# Altium footprint library Connectors.PcbLib: 120 footprints (part 7 of 8)
Each footprint in its own frame and in the unit in brackets; x right, y up, seen from the top. Pads: shape width x height; smd on the part's side, far side on the other; paste and mask are expansions set on the pad; w line width, h text height; cw(c..) or ccw(c..) is an arc to the next point about the centre after c.
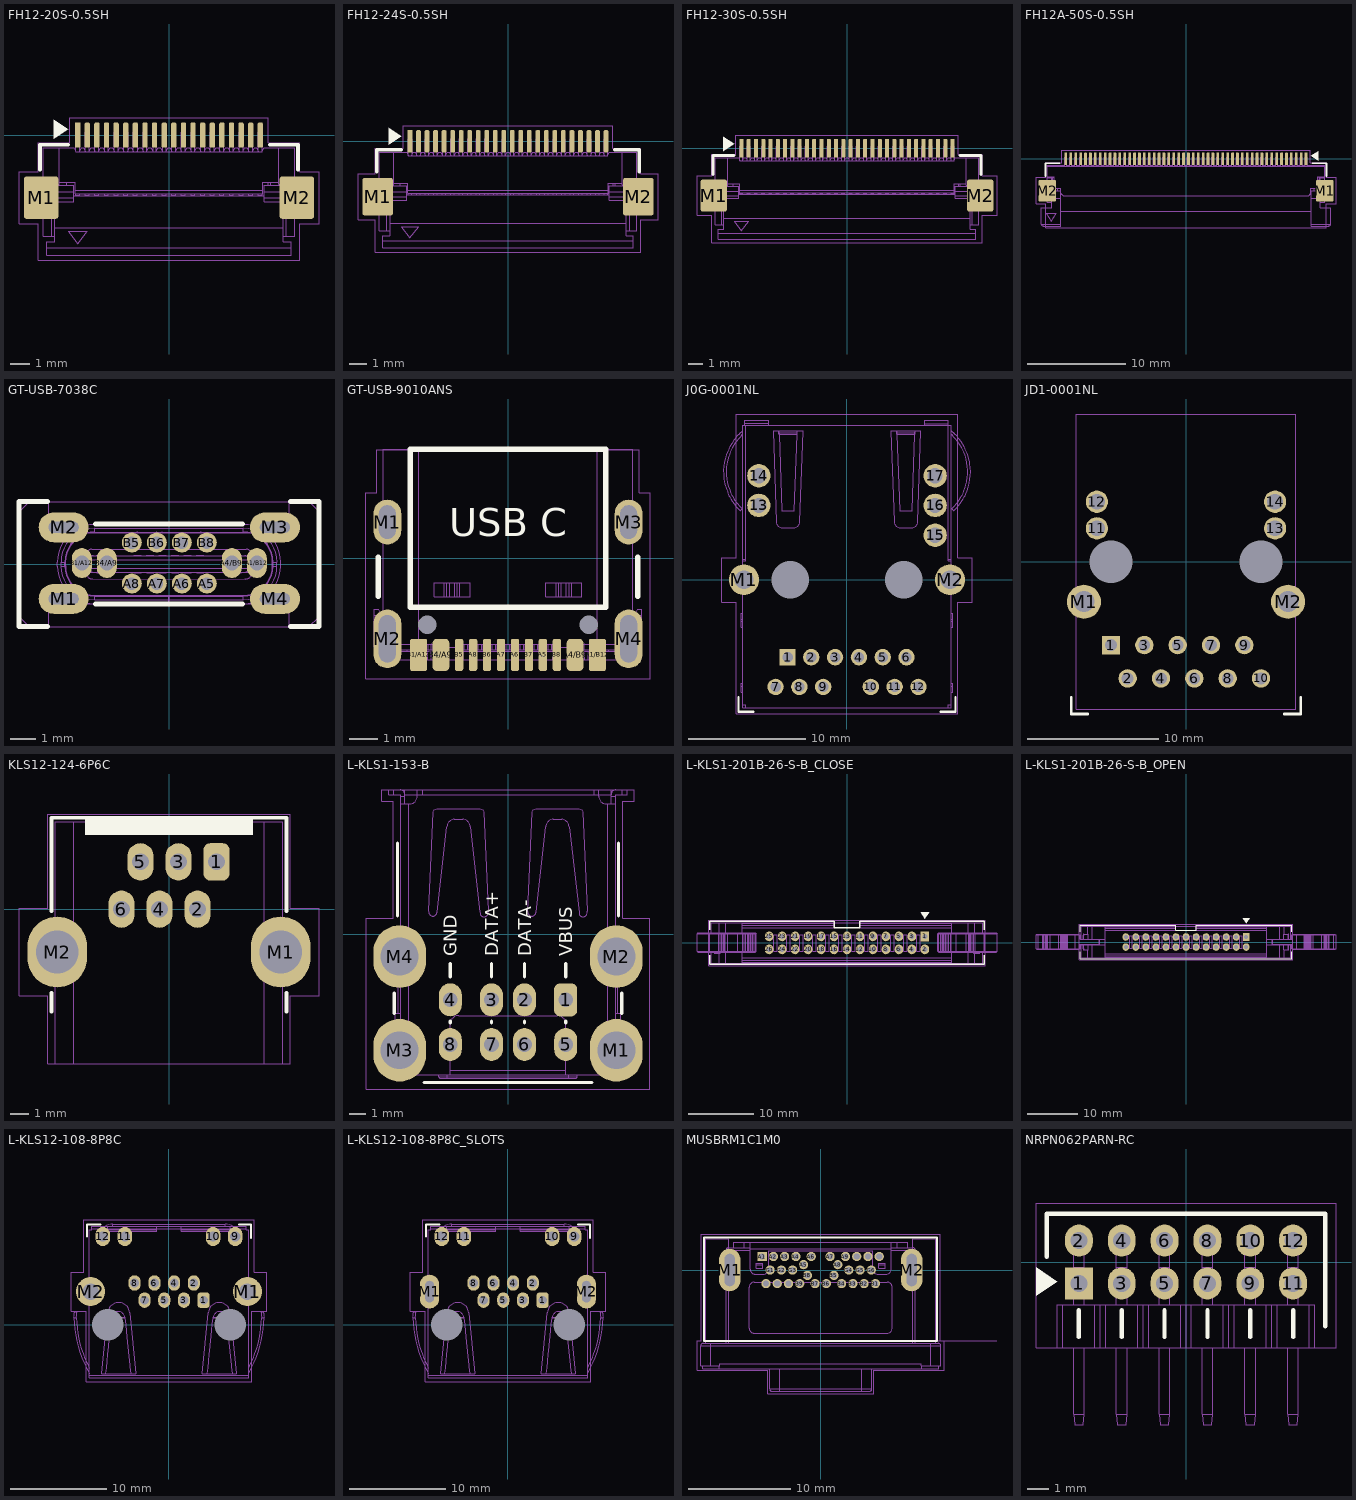
[diagram p6: the footprints below, top view; thin cyan lines are the x and y axes]

## FH12-20S-0.5SH [mm] "CONN FPC/FFC 20POS .5MM ZIF Contact Bottom"
height 2
pads (22):
  rect 0.275x1.3 smd paste-0.012 mask+0.04: 1(-4.75,0)
  rrect50% 0.275x1.3 smd paste-0.012 mask+0.04: 2(-4.25,0) 3(-3.75,0) 4(-3.25,0) 5(-2.75,0) 6(-2.25,0) 7(-1.75,0) 8(-1.25,0) 9(-0.75,0) 10(-0.25,0) 11(0.25,0) 12(0.75,0) 13(1.25,0) 14(1.75,0) 15(2.25,0) 16(2.75,0) 17(3.25,0) 18(3.75,0) 19(4.25,0) 20(4.75,0)
  rrect15% 1.8x2.2 smd paste-2 mask+0.05: M1(-6.65,-3.25) M2(6.65,-3.25)
Top Overlay:
  region: -5.25,0.3 -6,-0.2 -6,0.8
  lines w0.2: -6.7,-1.8 -6.7,-0.5 -5.25,-0.5 ; 5.25,-0.5 6.7,-0.5 6.7,-1.8
Top Paste:
  rectangle: -7.55,-4.35 -6.75,-3.35
  region: -5.75,-3.35 -6.55,-3.35 -6.55,-4.35 -5.75,-4.35
  rectangle: -7.55,-3.15 -6.75,-2.15
  region: -5.75,-2.15 -6.55,-2.15 -6.55,-3.15 -5.75,-3.15
  rectangle: 5.75,-4.35 6.55,-3.35
  region: 7.55,-3.35 6.75,-3.35 6.75,-4.35 7.55,-4.35
  rectangle: 5.75,-3.15 6.55,-2.15
  region: 7.55,-2.15 6.75,-2.15 6.75,-3.15 7.55,-3.15
Top Courtyard:
  lines w0.025: -7.8,-4.6 -7.8,-1.9 -6.8,-1.9 -6.8,-0.4 -5.15,-0.4 -5.15,0.9 5.15,0.9 5.15,-0.4 6.8,-0.4 6.8,-1.9 7.8,-1.9 7.8,-4.6 6.8,-4.6 6.8,-6.5 -6.8,-6.5 -6.8,-4.6 -7.8,-4.6
Top Assembly:
  drawing of 336 lines, arcs and shapes, not listed
  text ".Designator" at -4.511,-2.303 h2
3D body "FH12-20S-0.5SH.x_t": height 2.09, standoff -0.01, extent -7.05,-6.25 7.05,0.15

## FH12-24S-0.5SH [mm] "CONN FPC/FFC 24POS .5MM ZIF Contact Bottom"
height 2
pads (26):
  rect 0.275x1.3 smd paste-0.012 mask+0.04: 1(-5.75,0)
  rrect50% 0.275x1.3 smd paste-0.012 mask+0.04: 2(-5.25,0) 3(-4.75,0) 4(-4.25,0) 5(-3.75,0) 6(-3.25,0) 7(-2.75,0) 8(-2.25,0) 9(-1.75,0) 10(-1.25,0) 11(-0.75,0) 12(-0.25,0) 13(0.25,0) 14(0.75,0) 15(1.25,0) 16(1.75,0) 17(2.25,0) 18(2.75,0) 19(3.25,0) 20(3.75,0) 21(4.25,0) 22(4.75,0) 23(5.25,0) 24(5.75,0)
  rrect15% 1.8x2.2 smd paste-2 mask+0.05: M1(-7.65,-3.25) M2(7.65,-3.25)
Top Overlay:
  region: -6.25,0.3 -7,-0.2 -7,0.8
  lines w0.2: -7.7,-1.8 -7.7,-0.5 -6.25,-0.5 ; 6.25,-0.5 7.7,-0.5 7.7,-1.8
Top Paste:
  rectangle: -8.55,-4.35 -7.75,-3.35
  region: -6.75,-3.35 -7.55,-3.35 -7.55,-4.35 -6.75,-4.35
  rectangle: -8.55,-3.15 -7.75,-2.15
  region: -6.75,-2.15 -7.55,-2.15 -7.55,-3.15 -6.75,-3.15
  rectangle: 6.75,-4.35 7.55,-3.35
  region: 8.55,-3.35 7.75,-3.35 7.75,-4.35 8.55,-4.35
  rectangle: 6.75,-3.15 7.55,-2.15
  region: 8.55,-2.15 7.75,-2.15 7.75,-3.15 8.55,-3.15
Top Courtyard:
  lines w0.025: -8.8,-4.6 -8.8,-1.9 -7.8,-1.9 -7.8,-0.4 -6.15,-0.4 -6.15,0.9 6.15,0.9 6.15,-0.4 7.8,-0.4 7.8,-1.9 8.8,-1.9 8.8,-4.6 7.8,-4.6 7.8,-6.5 -7.8,-6.5 -7.8,-4.6 -8.8,-4.6
Top Assembly:
  drawing of 392 lines, arcs and shapes, not listed
  text ".Designator" at -4.511,-2.303 h2
3D body "FH12-24S-0.5SH.x_t": height 2.09, standoff -0.01, extent -8.05,-6.25 8.05,0.15

## FH12-30S-0.5SH [mm] "CONN FPC/FFC 30POS .5MM ZIF Contact Bottom"
height 2
pads (32):
  rect 0.275x1.3 smd paste-0.012 mask+0.04: 1(-7.25,0)
  rrect50% 0.275x1.3 smd paste-0.012 mask+0.04: 2(-6.75,0) 3(-6.25,0) 4(-5.75,0) 5(-5.25,0) 6(-4.75,0) 7(-4.25,0) 8(-3.75,0) 9(-3.25,0) 10(-2.75,0) 11(-2.25,0) 12(-1.75,0) 13(-1.25,0) 14(-0.75,0) 15(-0.25,0) 16(0.25,0) 17(0.75,0) 18(1.25,0) 19(1.75,0) 20(2.25,0) 21(2.75,0) 22(3.25,0) 23(3.75,0) 24(4.25,0) 25(4.75,0) 26(5.25,0) 27(5.75,0) 28(6.25,0) 29(6.75,0) 30(7.25,0)
  rrect15% 1.8x2.2 smd paste-2 mask+0.05: M1(-9.15,-3.25) M2(9.15,-3.25)
Top Overlay:
  region: -7.75,0.3 -8.5,-0.2 -8.5,0.8
  lines w0.2: -9.2,-1.8 -9.2,-0.5 -7.75,-0.5 ; 7.75,-0.5 9.2,-0.5 9.2,-1.8
Top Paste:
  rectangle: -10.05,-4.35 -9.25,-3.35
  region: -8.25,-3.35 -9.05,-3.35 -9.05,-4.35 -8.25,-4.35
  rectangle: -10.05,-3.15 -9.25,-2.15
  region: -8.25,-2.15 -9.05,-2.15 -9.05,-3.15 -8.25,-3.15
  rectangle: 8.25,-4.35 9.05,-3.35
  region: 10.05,-3.35 9.25,-3.35 9.25,-4.35 10.05,-4.35
  rectangle: 8.25,-3.15 9.05,-2.15
  region: 10.05,-2.15 9.25,-2.15 9.25,-3.15 10.05,-3.15
Top Courtyard:
  lines w0.025: -10.3,-4.6 -10.3,-1.9 -9.3,-1.9 -9.3,-0.4 -7.65,-0.4 -7.65,0.9 7.65,0.9 7.65,-0.4 9.3,-0.4 9.3,-1.9 10.3,-1.9 10.3,-4.6 9.3,-4.6 9.3,-6.5 -9.3,-6.5 -9.3,-4.6 -10.3,-4.6
Top Assembly:
  drawing of 991 lines, arcs and shapes, not listed
  text ".Designator" at -4.511,-2.303 h2
3D body "FH12-30S-0.5SH.STEP": height 2.09, standoff -0.01, extent -9.55,-6.25 9.55,0.15

## FH12A-50S-0.5SH [mm] "CONN FPC/FFC 50POS .5MM, ZIF Contact Top"
height 2
pads (52):
  rect 0.275x1.3 smd paste-0.012 mask+0.04: 1(12.25,0)
  rrect50% 0.275x1.3 smd paste-0.012 mask+0.04: 2(11.75,0) 3(11.25,0) 4(10.75,0) 5(10.25,0) 6(9.75,0) 7(9.25,0) 8(8.75,0) 9(8.25,0) 10(7.75,0) 11(7.25,0) 12(6.75,0) 13(6.25,0) 14(5.75,0) 15(5.25,0) 16(4.75,0) 17(4.25,0) 18(3.75,0) 19(3.25,0) 20(2.75,0) 21(2.25,0) 22(1.75,0) 23(1.25,0) 24(0.75,0) 25(0.25,0) 26(-0.25,0) 27(-0.75,0) 28(-1.25,0) 29(-1.75,0) 30(-2.25,0) 31(-2.75,0) 32(-3.25,0) 33(-3.75,0) 34(-4.25,0) 35(-4.75,0) 36(-5.25,0) 37(-5.75,0) 38(-6.25,0) 39(-6.75,0) 40(-7.25,0) 41(-7.75,0) 42(-8.25,0) 43(-8.75,0) 44(-9.25,0) 45(-9.75,0) 46(-10.25,0) 47(-10.75,0) 48(-11.25,0) 49(-11.75,0) 50(-12.25,0)
  rrect15% 1.8x2.2 smd paste-2 mask+0.05: M1(14.15,-3.25) M2(-14.15,-3.25)
Top Overlay:
  region: 12.75,0.3 13.5,-0.2 13.5,0.8
  lines w0.2: -14.35,-1.75 -14.35,-0.45 -12.9,-0.45 ; 12.9,-0.45 14.35,-0.45 14.35,-1.75
Top Paste:
  region: -13.25,-2.15 -14.05,-2.15 -14.05,-3.15 -13.25,-3.15
  rectangle: -15.05,-3.15 -14.25,-2.15
  region: -13.25,-3.35 -14.05,-3.35 -14.05,-4.35 -13.25,-4.35
  rectangle: -15.05,-4.35 -14.25,-3.35
  region: 15.05,-2.15 14.25,-2.15 14.25,-3.15 15.05,-3.15
  rectangle: 13.25,-3.15 14.05,-2.15
  region: 15.05,-3.35 14.25,-3.35 14.25,-4.35 15.05,-4.35
  rectangle: 13.25,-4.35 14.05,-3.35
Top Courtyard:
  lines w0.025: -15.3,-4.6 -14.3,-4.6 -14.3,-7.05 14.3,-7.05 14.3,-4.6 15.3,-4.6 15.3,-1.9 14.3,-1.9 14.3,-0.4 12.65,-0.4 12.65,0.9 -12.65,0.9 -12.65,-0.4 -14.3,-0.4 -14.3,-1.9 -15.3,-1.9 -15.3,-4.6
Top Assembly:
  drawing of 627 lines, arcs and shapes, not listed
  text ".Designator" at -4.511,-2.653 h2
3D body "FH12A-50S-0.5SH.x_t": height 2.05, standoff -0.1, extent -14.75,-6.85 14.75,0.15

## GT-USB-7038C [mm] "USB TYPE C Vertical 16pin THT Connector H=10.5mm"
height 2.56
pads (16):
  oval 0.8x1.2 hole 0.6 paste-2539.97 mask+0.05: A1/B12(3.512,0.038) A4/B9(2.512,0.038) B1/A12(-3.488,0.038) B4/A9(-2.488,0.038)
  round 0.8 hole 0.5 paste-2539.97 mask+0.05: A5(1.512,-0.782) A6(0.512,-0.782) A7(-0.488,-0.782) A8(-1.488,-0.782) B5(-1.488,0.858) B6(-0.488,0.858) B7(0.512,0.858) B8(1.512,0.858)
  oval 2x1.2 hole 0.45 slot 1.2 at 0 deg paste-2539.97 mask+0.05: M1(-4.213,-1.392) M2(-4.213,1.468) M3(4.237,1.468) M4(4.237,-1.392)
Top Overlay:
  lines w0.2: -4.85,-2.5 -6,-2.5 -6,2.5 -4.85,2.5 ; -2.95,-1.6 2.95,-1.6 ; -2.95,1.6 2.95,1.6 ; 4.85,-2.5 6,-2.5 6,2.5 4.85,2.5
Top Courtyard:
  lines w0.025: -6,-2.5 -6,2.5 6,2.5 6,-2.5 -6,-2.5
Top Assembly:
  drawing of 350 lines, arcs and shapes, not listed
  text ".Designator" at -4.511,2.047 h2
3D body "GT-USB-7038C.x_t": height 10.52, standoff -1.78, extent -6,-2.5 6,2.5

## GT-USB-9010ANS [mm] "USB TYPE C 16pin SMT Connector L=7.35mm"
height 2.56
pads (18):
  rrect20% 0.6x1.15 smd paste+0 mask+0.05: A1/B12(3.2,-3.45) B1/A12(-3.2,-3.45)
  rrect50% 0.6x1.15 smd paste+0 mask+0.05: A4/B9(2.4,-3.45) B4/A9(-2.4,-3.45)
  rrect50% 0.3x1.15 smd paste+0 mask+0.05: A5(1.25,-3.45) A6(0.25,-3.45) A7(-0.25,-3.45) A8(-1.25,-3.45) B5(-1.75,-3.45) B6(-0.75,-3.45) B7(0.75,-3.45) B8(1.75,-3.45)
  round 0 hole 0.65 unplated: KEY(-2.89,-2.375) KEY(2.89,-2.375)
  oval 1x1.6 hole 0.6 slot 1.2 at 90 deg paste-2539.97 mask+0.05: M1(-4.32,1.305) M3(4.32,1.305)
  oval 1x2.1 hole 0.6 slot 1.7 at 90 deg paste-2539.97 mask+0.05: M2(-4.32,-2.875) M4(4.32,-2.875)
Top Overlay:
  lines w0.2: -4.65,-1.353 -4.65,0.047 ; 4.65,-1.353 4.65,0.047 ; -3.5,-1.745 -3.5,3.905 3.5,3.905 3.5,-1.745 -3.5,-1.745
  text "USB C" at -2.111,0.8 h1
Top Courtyard:
  lines w0.025: -5.1,-4.3 5.1,-4.3 5.1,2.35 4.7,2.35 4.7,3.9 -4.7,3.9 -4.7,2.35 -5.1,2.35 -5.1,-4.3
Top Assembly:
  drawing of 185 lines, arcs and shapes, not listed
  text ".Designator" at -4.511,0.319 h2
3D body "698b116-264-211.x_t": height 3.25, standoff -0.91, extent -4.79,-3.803 4.79,3.905

## J0G-0001NL [mm] "RJ45 Connector"
height 0.6
pads (21):
  rect 1.4x1.4 hole 0.9: 1(-5.075,-6.6)
  round 1.4 hole 0.9: 2(-3.045,-6.6) 3(-1.015,-6.6) 4(1.015,-6.6) 5(3.045,-6.6) 6(5.075,-6.6) 7(-6.095,-9.14) 8(-4.065,-9.14) 9(-2.035,-9.14) 10(2.035,-9.14) 11(4.065,-9.14) 12(6.095,-9.14)
  round 0 hole 3.2 unplated mask+0.05: 3.25mm(-4.825,0) 3.25mm(4.825,0)
  round 2 hole 1.3: 13(-7.52,6.35) 14(-7.52,8.89) 15(7.52,3.81) 16(7.52,6.35) 17(7.52,8.89)
  round 2.6 / inner round 2 / far side round 2.6 hole 1.6: M1(-8.79,0) M2(8.79,0)
Top Overlay:
  lines w0.2: -9.265,-10 -9.265,-11.27 -7.995,-11.27 ; 7.995,-11.27 9.265,-11.27 9.265,-10
Top Courtyard:
  lines w0.025: -10.7,-1.9 -9.45,-1.9 -9.45,-11.45 9.45,-11.45 9.45,-1.9 10.7,-1.9 10.7,1.9 9.45,1.9 9.45,14.15 -9.45,14.15 -9.45,1.9 -10.7,1.9 -10.7,-1.9
Top Assembly:
  drawing of 238 lines, arcs and shapes, not listed
  text ".Designator" at -6.763,-0.679 h3
3D body "J0G-0001NL_3D.x_t": height 13.1, standoff -3.41, extent -10.541,-10.92 10.541,13.628

## JD1-0001NL [mm] "RJ45 Connector"
height 0.6
pads (18):
  rect 1.4x1.4 hole 0.9: 1(-5.715,-6.35)
  round 1.4 hole 0.9: 2(-4.445,-8.89) 3(-3.175,-6.35) 4(-1.905,-8.89) 5(-0.635,-6.35) 6(0.635,-8.89) 7(1.905,-6.35) 8(3.175,-8.89) 9(4.445,-6.35) 10(5.715,-8.89)
  round 0 hole 3.25 unplated mask+0.05: 3.25mm(-5.715,0) 3.25mm(5.715,0)
  round 1.7 hole 1.2: 11(-6.785,2.54) 12(-6.785,4.57) 13(6.785,2.54) 14(6.785,4.57)
  round 2.6 / inner round 2 / far side round 2.6 hole 1.6: M1(-7.775,-3.05) M2(7.775,-3.05)
Top Overlay:
  lines w0.2: -8.75,-10.33 -8.75,-11.6 -7.48,-11.6 ; 7.48,-11.6 8.75,-11.6 8.75,-10.33
Top Courtyard:
  lines w0.025: -8.375,-11.25 -8.375,11.25 8.375,11.25 8.375,-11.25 -8.375,-11.25
Top Assembly:
  text ".Designator" at -6.763,6.321 h3
3D body "JD1-0001NL_3D.x_t": height 16, standoff -3.4, extent -9.875,-10.925 9.875,11.313

## KLS12-124-6P6C [mm] "PCB Modular Jack 55 Series"
height 14.4
pads (8):
  rrect50% 1.4x2 hole 0.9 mask+0.05: 1(2.55,2.54)
  oval 1.4x2 hole 0.9 mask+0.05: 2(1.53,0) 3(0.51,2.54) 4(-0.51,0) 5(-1.53,2.54) 6(-2.55,0)
  oval 3.2x3.8 hole 2.3 mask+0.05: M1(6,-2.3) M2(-6,-2.3)
Top Overlay:
  region: 4.5,4.9 4.5,4 -4.5,4 -4.5,4.9
  lines w0.2: -6.3,-5.5 -6.3,-4.5 ; -6.3,-0.1 -6.3,4.9 6.3,4.9 6.3,-0.1 ; 6.3,-5.5 6.3,-4.5
Top Courtyard:
  lines w0.025: -8.05,-4.65 -8.05,0.05 -6.5,0.05 -6.5,5.1 6.5,5.1 6.5,0.05 8.05,0.05 8.05,-4.65 6.5,-4.65 6.5,-8.3 -6.5,-8.3 -6.5,-4.65 -8.05,-4.65
Top Assembly:
  lines w0.05: -6.5,-3.369 -6.5,-3.597 cw(c-6,-2.3) -6.5,-1.003 -6.5,-1.231 ; -6.1,-3.476 cw(c-6,-2.3) -6.1,-1.124 ; -5.1,-8.3 -5.1,4.7 ; 5.1,-8.3 5.1,4.7 ; 6.1,-3.476 ccw(c6,-2.3) 6.1,-1.124 ; 6.5,-3.369 6.5,-3.597 ccw(c6,-2.3) 6.5,-1.003 6.5,-1.231 ; -6.1,-8.3 -6.1,4.7 6.1,4.7 6.1,-8.3 -6.1,-8.3
  text ".Designator" at -5.637,-2.566 h2.5
3D body "615006138421.x_t": height 14.55, standoff -3.25, extent -7.39,-8.3 7.39,4.7

## L-KLS1-153-B [mm] "Connector USB 2.0 A Type A Female"
height 15.7
pads (12):
  rrect50% 1.4x2 hole 0.9 mask+0.05: 1(3.5,-3.99)
  oval 1.4x2 hole 0.9 mask+0.05: 2(1,-3.99) 3(-1,-3.99) 4(-3.5,-3.99) 5(3.5,-6.7) 6(1,-6.7) 7(-1,-6.7) 8(-3.5,-6.7)
  oval 3.2x3.8 hole 2.3 mask+0.05: M1(6.57,-7.05) M2(6.57,-1.37) M3(-6.57,-7.05) M4(-6.57,-1.37)
Top Overlay:
  lines w0.2: -6.9,-4.8 -6.9,-3.6 ; -6.7,1.1 -6.7,5.5 ; -5.1,-9 5.1,-9 ; -3.5,-5.4 -3.5,-5.28 ; -3.5,-2.6 -3.5,-1.8 ; -1,-5.4 -1,-5.28 ; -1,-2.6 -1,-1.8 ; 1,-5.4 1,-5.28 ; 1,-2.6 1,-1.8 ; 3.5,-5.4 3.5,-5.28 ; 3.5,-2.6 3.5,-1.8 ; 6.7,1.1 6.7,5.5 ; 6.9,-4.8 6.9,-3.6
  text "VBUS" at 3.9,-1.35 h0.8
  text "DATA-" at 1.4,-1.35 h0.8
  text "DATA+" at -0.6,-1.35 h0.8
  text "GND" at -3.1,-1.35 h0.8
Top Courtyard:
  lines w0.025: -8.6,-9.4 -8.6,0.95 -6.95,0.95 -6.95,8.05 -7.65,8.05 -7.65,8.75 7.65,8.75 7.65,8.05 6.95,8.05 6.95,0.95 8.6,0.95 8.6,-9.4 -8.6,-9.4
Top Assembly:
  lines w0.05: -6.942,8.45 -6.942,8.75 ; -6.85,-8.194 -7.544,-8.021 ; -6.85,-6.263 -7.544,-6.434 ; -6.85,-5.294 -6.55,-5.294 ; -6.741,-2.433 -7.544,-2.233 ; -6.724,-0.54 -6.724,-2.44 -6.656,-2.647 -6.656,-4.799 ; -6.55,-4.799 -6.85,-4.799 -6.85,-8.25 ccw(c-6.55,-8.25) -6.55,-8.55 ; -6.55,-0.54 -7.113,-0.54 -7.544,-0.646 ; -6.55,7.9 -5.953,7.9 ccw(c-5.953,8.35) -5.503,8.35 -5.503,8.75 ; -6.55,8.35 -6.25,8.35 ; -6.25,7.9 -6.25,8.75 6.25,8.75 6.25,7.9 ; -6.05,-8.55 -6.05,7.9 ; -5.503,8.45 -6.25,8.45 ccw(c-6.55,8.45) -6.55,8.75 -7.242,8.75 -7.242,8.45 -6.55,8.45 -6.55,-8.55 ; -5.495,8.75 -5.495,8.45 6.25,8.45 cw(c6.55,8.45) 6.55,8.75 7.242,8.75 7.242,8.45 6.55,8.45 6.55,-8.55 ; -5.195,8.45 -5.195,8.75 ; -4.807,1.34 ccw(c-4.555,1.34) -4.555,1.088 ccw(c-4.555,1.338) -4.305,1.338 -3.702,6.509 cw(c-3.252,6.509) -3.252,6.958 -2.745,6.958 cw(c-2.745,6.509) -2.295,6.509 -1.7,1.338 ; -4.8,1.384 -4.521,7.405 -4.506,7.482 -4.46,7.544 -4.398,7.583 -4.32,7.598 -1.677,7.598 -1.6,7.583 -1.538,7.544 -1.492,7.482 -1.476,7.405 -1.198,1.384 ; -4.2,-8.55 -4.2,-8.65 ; -3.7,-8.75 -3.7,-8.55 ; -3.501,-8.55 -3.501,-5.448 cw(c-2.999,-5.448) -2.999,-4.946 2.999,-4.946 cw(c2.999,-5.448) 3.501,-5.448 3.501,-8.55 ; -3.501,-8.25 3.501,-8.25 ; -1.698,1.297 ccw(c-1.448,1.297) -1.448,1.047 ; -1.448,1.045 ccw(c-1.448,1.287) -1.206,1.287 -1.206,1.384 ; 1.195,1.328 1.476,7.405 1.492,7.482 1.538,7.544 1.6,7.583 1.677,7.598 4.32,7.598 4.398,7.583 4.46,7.544 4.506,7.482 4.521,7.405 4.8,1.384 4.8,1.287 cw(c4.557,1.287) 4.557,1.045 ; 1.198,1.34 ccw(c1.45,1.34) 1.45,1.088 ccw(c1.45,1.338) 1.7,1.338 2.295,6.509 cw(c2.745,6.509) 2.745,6.958 3.252,6.958 cw(c3.252,6.509) 3.702,6.509 4.31,1.298 ; 3.7,-8.75 3.7,-8.55 ; 4.2,-8.55 4.2,-8.65 ; 4.307,1.297 ccw(c4.557,1.297) 4.557,1.047 ; 5.203,8.45 5.203,8.75 ; 5.503,8.75 5.503,8.35 ccw(c5.953,8.35) 5.953,7.9 6.55,7.9 ; 6.05,-8.55 6.05,7.9 ; 6.25,8.35 6.55,8.35 ; 6.55,-5.294 6.85,-5.294 ; 6.55,-4.799 6.85,-4.799 6.85,-8.25 cw(c6.55,-8.25) 6.55,-8.55 ; 6.55,-0.54 7.113,-0.54 7.544,-0.646 ; 6.656,-4.799 6.656,-2.647 6.724,-2.44 6.724,-0.54 ; 6.741,-2.433 7.544,-2.233 ; 6.85,-8.194 7.544,-8.021 ; 6.85,-6.263 7.544,-6.434 ; 6.942,8.45 6.942,8.75 ; -7.544,-8.021 -7.544,-6.434 ; -7.544,-8.021 -7.696,-7.94 -7.696,-6.514 -7.544,-6.434 ; -7.544,-2.233 -7.544,-0.646 ; -7.544,-2.233 -7.696,-2.152 -7.696,-0.726 -7.544,-0.646 ; -6.55,-8.55 6.55,-8.55 ; -4.2,-8.65 ccw(c-4.1,-8.65) -4.1,-8.75 4.1,-8.75 ccw(c4.1,-8.65) 4.2,-8.65 ; -4.2,-8.65 4.2,-8.65 ; 7.544,-8.021 7.544,-6.434 ; 7.544,-8.021 7.696,-7.94 7.696,-6.514 7.544,-6.434 ; 7.544,-2.233 7.544,-0.646 ; 7.544,-2.233 7.696,-2.152 7.696,-0.726 7.544,-0.646
  text ".Designator" at -5.637,-1.966 h2.5
3D body "USB_2_0_Female.x_t": height 16.15, standoff -4.05, extent -7.696,-8.75 7.696,8.75

## L-KLS1-201B-26-S-B_CLOSE [mm]
pads (26):
  rect 1.3x1.5 hole 0.8: 1(12,1)
  oval 1.3x1.5 hole 0.8: 2(12,-1) 3(10,1) 4(10,-1) 5(8,1) 6(8,-1) 7(6,1) 8(6,-1) 9(4,1) 10(4,-1) 11(2,1) 12(2,-1) 13(0,1) 14(0,-1) 15(-2,1) 16(-2,-1) 17(-4,1) 18(-4,-1) 19(-6,1) 20(-6,-1) 21(-8,1) 22(-8,-1) 23(-10,1) 24(-10,-1) 25(-12,1) 26(-12,-1)
Top Overlay:
  region: 12,3.7 11.333,4.7 12.667,4.7
  lines w0.2: -21.1,-1.9 -21.1,-3.3 21.1,-3.3 21.1,-1.9 ; -21.1,2 -21.1,3.3 -2,3.3 -2,2.3 2,2.3 2,3.3 21.1,3.3 21.1,2
Top Courtyard:
  lines w0.025: -21.3,-3.5 -21.3,3.5 21.3,3.5 21.3,-3.5 -21.3,-3.5
Top Assembly:
  drawing of 675 lines, arcs and shapes, not listed
  text ".Designator" at -4.511,3.547 h2
3D body "L-KLS1-201B-26-S-B_CLOSE.x_t": height 17.01, standoff -2.99, extent -23.093,-3.1 23.093,3.1

## L-KLS1-201B-26-S-B_OPEN [mm]
pads (26):
  rect 1.3x1.5 hole 0.8: 1(12,1)
  oval 1.3x1.5 hole 0.8: 2(12,-1) 3(10,1) 4(10,-1) 5(8,1) 6(8,-1) 7(6,1) 8(6,-1) 9(4,1) 10(4,-1) 11(2,1) 12(2,-1) 13(0,1) 14(0,-1) 15(-2,1) 16(-2,-1) 17(-4,1) 18(-4,-1) 19(-6,1) 20(-6,-1) 21(-8,1) 22(-8,-1) 23(-10,1) 24(-10,-1) 25(-12,1) 26(-12,-1)
Top Overlay:
  region: 12,3.7 11.333,4.7 12.667,4.7
  lines w0.2: -21.1,-1.9 -21.1,-3.3 21.1,-3.3 21.1,-1.9 ; -21.1,2 -21.1,3.3 -2,3.3 -2,2.3 2,2.3 2,3.3 21.1,3.3 21.1,2
Top Courtyard:
  lines w0.025: -21.3,-3.5 -21.3,3.5 21.3,3.5 21.3,-3.5 -21.3,-3.5
Top Assembly:
  drawing of 685 lines, arcs and shapes, not listed
  text ".Designator" at -4.511,3.547 h2
3D body "L-KLS1-201B-26-S-B_OPEN.x_t": height 14.95, standoff -2.99, extent -29.907,-3.1 29.907,3.1

## L-KLS12-108-8P8C [mm] "Ethernet RJ-45 Socket"
height 0.6
pads (16):
  rrect50% 1.25x1.6 hole 0.9: 1(3.59,2.54)
  oval 1.25x1.6 hole 0.9: 2(2.57,4.32) 3(1.55,2.54) 4(0.53,4.32) 5(-0.49,2.54) 6(-1.51,4.32) 7(-2.53,2.54) 8(-3.57,4.32)
  oval 1.5x2 hole 1.05: 9(6.86,9.14) 10(4.57,9.14) 11(-4.57,9.14) 12(-6.86,9.14)
  round 3 hole 1.7 unplated: M1(8.125,3.43) M2(-8.125,3.43)
  round 0 hole 3.25 unplated: M3(6.35,0) M4(-6.35,0)
Top Overlay:
  lines w0.2: -8.5,9.13 -8.5,10.4 -7.103,10.4 ; 7.23,10.4 8.5,10.4 8.5,9.003
Top Courtyard:
  lines w0.025: -10.15,1.4 -8.55,1.4 -8.55,-5.9 8.55,-5.9 8.55,1.4 10.15,1.4 10.15,5.45 8.85,5.45 8.85,10.85 -8.85,10.85 -8.85,5.45 -10.15,5.45 -10.15,1.4
Top Assembly:
  drawing of 175 lines, arcs and shapes, not listed
  text ".Designator" at -6.863,-0.679 h3
3D body "KLS12-108-8P.stp": height 15.23, standoff -3.21, extent -9.875,-5.895 9.875,10.555

## L-KLS12-108-8P8C_SLOTS [mm] "Ethernet RJ-45 Socket"
height 0.6
pads (16):
  rrect50% 1.25x1.6 hole 0.9: 1(3.59,2.54)
  oval 1.25x1.6 hole 0.9: 2(2.57,4.32) 3(1.55,2.54) 4(0.53,4.32) 5(-0.49,2.54) 6(-1.51,4.32) 7(-2.53,2.54) 8(-3.57,4.32)
  oval 1.5x2 hole 1.05: 9(6.86,9.14) 10(4.57,9.14) 11(-4.57,9.14) 12(-6.86,9.14)
  oval 2x3.5 hole 0.9 slot 2.2 at 90 deg: M1(-8.125,3.43) M2(8.125,3.43)
  round 0 hole 3.25 unplated: M3(6.35,0) M4(-6.35,0)
Top Overlay:
  lines w0.2: -8.5,9.13 -8.5,10.4 -7.103,10.4 ; 7.23,10.4 8.5,10.4 8.5,9.003
Top Courtyard:
  lines w0.025: -10.15,1.4 -10.15,5.45 -8.85,5.45 -8.85,10.85 8.85,10.85 8.85,5.45 10.15,5.45 10.15,1.4 8.55,1.4 8.55,-5.9 -8.55,-5.9 -8.55,1.4 -10.15,1.4
Top Assembly:
  drawing of 175 lines, arcs and shapes, not listed
  text ".Designator" at -6.763,-0.679 h3
3D body "KLS12-108-8P.stp": height 15.23, standoff -3.21, extent -9.875,-5.895 9.875,10.555

## MUSBRM1C1M0 [mm] "RUGGED USB TYPE 'C' RECEPTACLE, RIGHT ANGLE, PCB MOUNT"
height 0.6
pads (32):
  rect 0.9x0.9 hole 0.6 mask+0.05: A1(-5.725,1.325)
  round 0.9 hole 0.6 mask+0.05: A2(-4.625,1.325) A3(-3.525,1.325) A4(-2.425,1.325) A5(-1.675,0.525) A6(-0.925,1.325) A7(0.925,1.325) A8(1.675,0.525) A9(2.425,1.325) A10(3.525,1.325) A11(4.625,1.325) A12(5.725,1.325) B1(5.35,-1.325) B2(4.25,-1.325) B3(3.15,-1.325) B4(2.05,-1.325) B5(1.3,-0.525) B6(0.55,-1.325) B7(-0.55,-1.325) B8(-1.3,-0.525) B9(-2.05,-1.325) B10(-3.15,-1.325) B11(-4.25,-1.325) B12(-5.35,-1.325) G1(-4.95,0) G2(-3.85,0) G3(-2.75,0) G4(2.75,0) G5(3.85,0) G6(4.95,0)
  oval 2.1x4.15 hole 1 slot 3.15 at 90 deg: M1(-8.9,0) M2(8.9,0)
Top Overlay:
  lines w0.2: -11.4,-6.93 11.4,-6.93 11.4,3.2 -11.4,3.2 -11.4,-6.93
Top Courtyard:
  lines w0.025: -12.1,-9.8 -12.1,-6.9 -11.7,-6.9 -11.7,3.5 11.7,3.5 11.7,-6.9 12.1,-6.9 12.1,-9.8 5.2,-9.8 5.2,-12.1 -5.2,-12.1 -5.2,-9.8 -12.1,-9.8
Top Assembly:
  lines w0.05: -11.55,-9.375 -11.55,-9.675 11.55,-9.675 11.55,-9.375 ; -11.25,-7.175 -11.25,3.075 -9,3.075 -9,-7.175 ; -10.75,-9.375 -10.75,-7.175 ; -9.9,-9.675 -9.9,-9.375 ; -9.25,-7.175 -9.25,1.95 ; -8.5,2.2 -8.5,2.7 8.5,2.7 8.5,2.2 ; -7.5,2.2 -7.5,2.7 ; -6.9,1.95 -9.25,1.95 ; -6.9,2.1 6.9,2.1 ; -6.9,2.2 -9,2.2 ccw(c-9,1.95) -9.25,1.95 ; -6.9,2.7 -6.9,0.1 ccw(c-6.4,0.1) -6.4,-0.4 -5.6,-0.4 ccw(c-5.6,0.1) -5.1,0.1 -5.1,1.9 5.1,1.9 5.1,0.1 ccw(c5.6,0.1) 5.6,-0.4 6.4,-0.4 ccw(c6.4,0.1) 6.9,0.1 6.9,2.7 ; -6.325,0.542 -5.675,0.542 ; -5,-9.675 -5,-11.625 ; -4,-11.875 -4,-9.675 ; 4,-11.875 4,-9.675 ; 5,-9.675 5,-11.625 ; 5.675,0.542 6.325,0.542 ; 6.9,1.95 9.25,1.95 ; 6.9,2.2 9,2.2 cw(c9,1.95) 9.25,1.95 ; 7.5,2.2 7.5,2.7 ; 9,-7.175 9,3.075 11.25,3.075 11.25,-7.175 ; 9.25,-7.175 9.25,1.95 ; 9.9,-9.675 9.9,-9.375 ; 10.75,-9.375 10.75,-7.175 ; 11.5,-6.93 17.25,-6.93 ; -11.75,-7.425 cw(c-11.5,-7.425) -11.5,-7.175 11.5,-7.175 cw(c11.5,-7.425) 11.75,-7.425 ; -11.75,-7.425 11.75,-7.425 ; -11.75,-7.425 -11.75,-9.375 -9.85,-9.375 -9.85,-9.175 9.85,-9.175 9.85,-9.375 11.75,-9.375 11.75,-7.425 ; -5,-11.625 ccw(c-4.75,-11.625) -4.75,-11.875 4.75,-11.875 ccw(c4.75,-11.625) 5,-11.625 ; -5,-11.625 5,-11.625 ; -7,-5.675 ccw(c-6.5,-5.675) -6.5,-6.175 6.5,-6.175 ccw(c6.5,-5.675) 7,-5.675 7,-1.675 ccw(c6.5,-1.675) 6.5,-1.175 -6.5,-1.175 ccw(c-6.5,-1.675) -7,-1.675 -7,-5.675 ; -6.325,0.2 -6.325,0.671 -5.675,0.671 -5.675,0.2 -6.325,0.2 ; 5.675,0.2 5.675,0.671 6.325,0.671 6.325,0.2 5.675,0.2
  text "PCB Edge" at 11.737,-6.533 h0.8
3D body "MUSBRM1C1M0.x_t": height 7.6, standoff -3.05, extent -11.75,-11.875 11.75,3.075

## NRPN062PARN-RC [mm] ".079” [2.00 mm] Contact Centers Right Angle"
pads (12):
  rect 1.3x1.5 hole 0.8: 1(-5,-1)
  oval 1.3x1.5 hole 0.8: 2(-5,1) 3(-3,-1) 4(-3,1) 5(-1,-1) 6(-1,1) 7(1,-1) 8(1,1) 9(3,-1) 10(3,1) 11(5,-1) 12(5,1)
Top Overlay:
  region: -6,-0.917 -7,-1.583 -7,-0.25
  lines w0.2: -6.5,0.25 -6.5,2.25 6.5,2.25 6.5,-3 ; -5,-3.5 -5,-2.25 ; -3,-3.5 -3,-2.25 ; -1,-3.5 -1,-2.25 ; 1,-3.5 1,-2.25 ; 3,-3.5 3,-2.25 ; 5,-3.5 5,-2.25
Top Courtyard:
  lines w0.025: -7,-4 -7,2.75 7,2.75 7,-4 -7,-4
Top Assembly:
  lines w0.05: -5.75,-4 -5.75,-2 ; -5.25,-4 -5.25,-7.1 ; -5.25,-2 -5.25,1.25 -4.75,1.25 -4.75,-2 ; -5.25,-0.25 -4.75,-0.25 ; -4.75,-4 -4.75,-7.1 ; -4.25,-4 -4.25,-2 ; -4,-4 -4,-2 ; -3.75,-4 -3.75,-2 ; -3.25,-4 -3.25,-7.1 ; -3.25,-2 -3.25,1.25 -2.75,1.25 -2.75,-2 ; -3.25,-0.25 -2.75,-0.25 ; -2.75,-4 -2.75,-7.1 ; -2.25,-4 -2.25,-2 ; -2,-4 -2,-2 ; -1.75,-4 -1.75,-2 ; -1.25,-4 -1.25,-7.1 ; -1.25,-2 -1.25,1.25 -0.75,1.25 -0.75,-2 ; -1.25,-0.25 -0.75,-0.25 ; -0.75,-4 -0.75,-7.1 ; -0.25,-4 -0.25,-2 ; 0,-4 0,-2 ; 0.25,-4 0.25,-2 ; 0.75,-4 0.75,-7.1 ; 0.75,-2 0.75,1.25 1.25,1.25 1.25,-2 ; 0.75,-0.25 1.25,-0.25 ; 1.25,-4 1.25,-7.1 ; 1.75,-4 1.75,-2 ; 2,-4 2,-2 ; 2.25,-4 2.25,-2 ; 2.75,-4 2.75,-7.1 ; 2.75,-2 2.75,1.25 3.25,1.25 3.25,-2 ; 2.75,-0.25 3.25,-0.25 ; 3.25,-4 3.25,-7.1 ; 3.75,-4 3.75,-2 ; 4,-4 4,-2 ; 4.25,-4 4.25,-2 ; 4.75,-4 4.75,-7.1 ; 4.75,-2 4.75,1.25 5.25,1.25 5.25,-2 ; 4.75,-0.25 5.25,-0.25 ; 5.25,-4 5.25,-7.1 ; 5.75,-4 5.75,-2 ; -5.25,-7.1 -5.2,-7.6 -4.8,-7.6 -4.75,-7.1 ; -5.25,-7.1 -4.75,-7.1 ; -3.25,-7.1 -3.2,-7.6 -2.8,-7.6 -2.75,-7.1 ; -3.25,-7.1 -2.75,-7.1 ; -1.25,-7.1 -1.2,-7.6 -0.8,-7.6 -0.75,-7.1 ; -1.25,-7.1 -0.75,-7.1 ; 0.75,-7.1 0.8,-7.6 1.2,-7.6 1.25,-7.1 ; 0.75,-7.1 1.25,-7.1 ; 2.75,-7.1 2.8,-7.6 3.2,-7.6 3.25,-7.1 ; 2.75,-7.1 3.25,-7.1 ; 4.75,-7.1 4.8,-7.6 5.2,-7.6 5.25,-7.1 ; 4.75,-7.1 5.25,-7.1 ; -6,-4 6,-4 6,-2 -6,-2 -6,-4
  text ".Designator" at -4.511,3.547 h2
3D body "NRPN062PARN-RC.x_t": height 4.01, standoff -2.79, extent -6,-7.6 6,1.25